# Altium schematic symbol library AP33771CFBZ-13-FA02.SchLib: 1 symbol
Pins are listed as number, name and electrical type; pins without a type are passive.

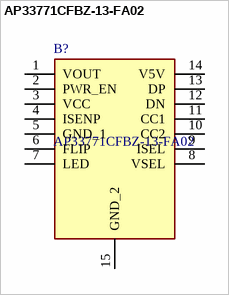
[diagram p0: symbol AP33771CFBZ-13-FA02]

## AP33771CFBZ-13-FA02
designator B?
USB, Type-C Controller PMIC 2.75V ~ 3.25V, 3.3V ~ 5.33V, 4.37V ~ 31V -40C ~ 85C (TA) W-DFN3030-14 (Type A1); Manufacturer_Name: Diodes Incorporated; Geometry.Height: 0.8mm; Mouser Part Number: *; Mouser Price/Stock: *; Manufacturer_Part_Number: AP33771CFBZ-13-FA02; Datasheet Link: https://www.diodes.com/datasheet/download/AP33771C.pdf
footprint SON40P300X300X80-15N-D
pins: 1 VOUT, 2 PWR_EN, 3 VCC, 4 ISENP, 5 GND_1, 6 FLIP, 7 LED, 8 VSEL, 9 ISEL, 10 CC2, 11 CC1, 12 DN, 13 DP, 14 V5V, 15 GND_2